# Altium schematic symbol library Schlib1.SchLib: 29 symbols
Pins are listed as number, name and electrical type; pins without a type are passive.

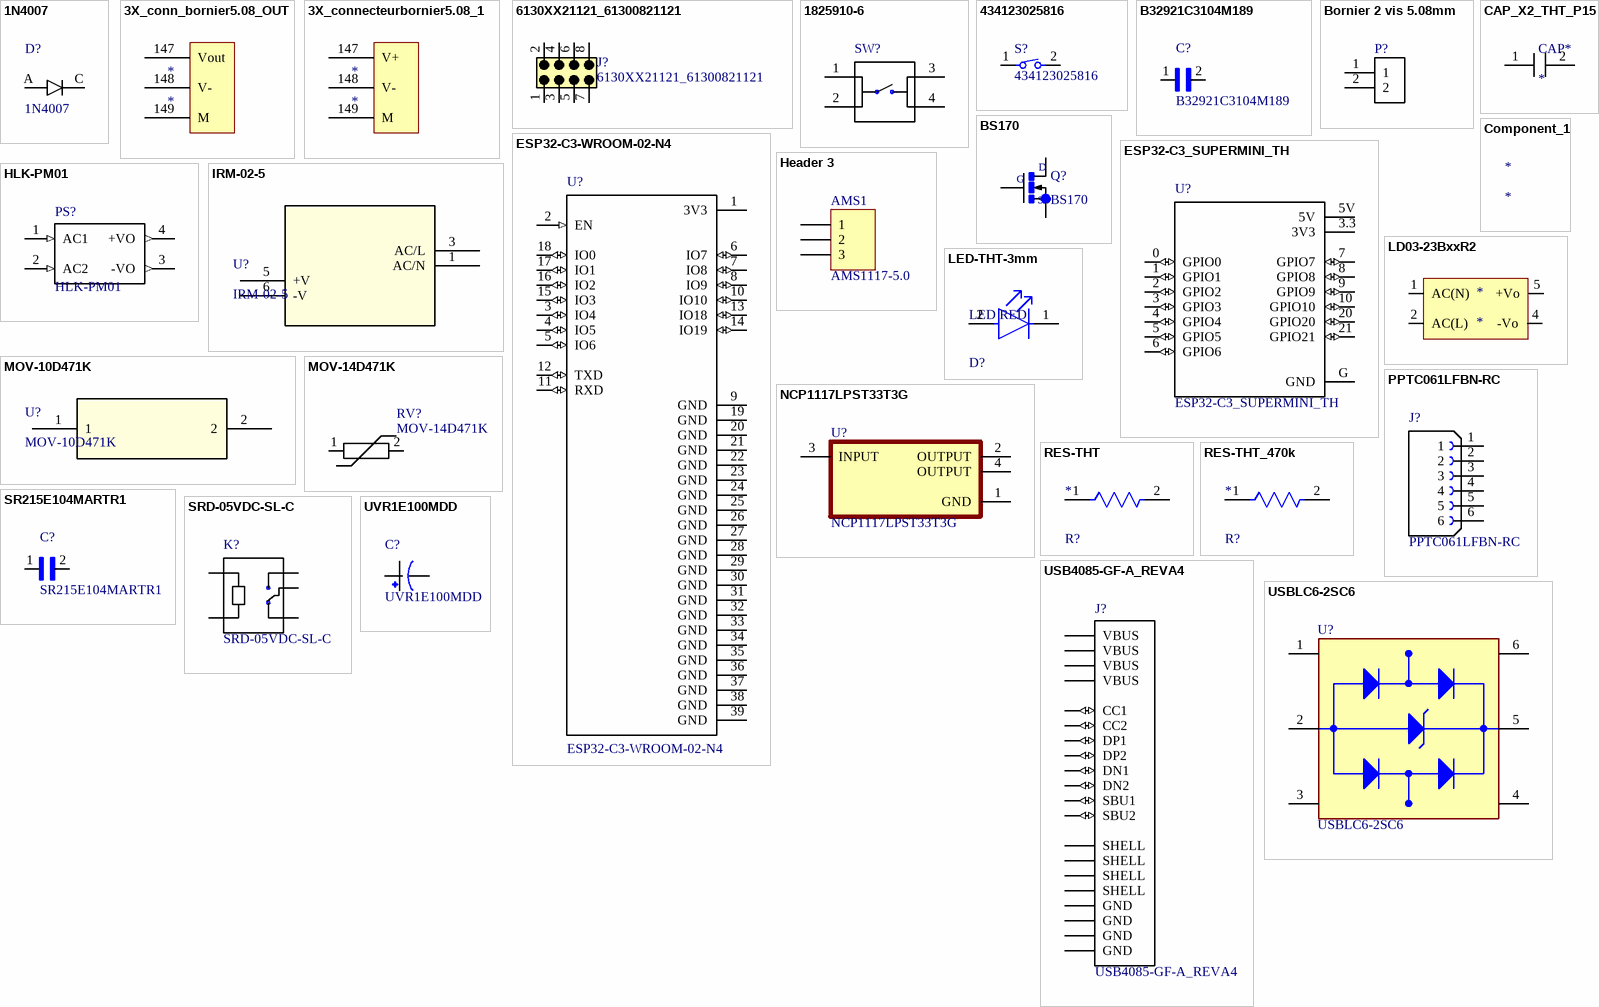
[diagram p0: symbols 1N4007 to UVR1E100MDD]

## 1N4007
designator D?
Rectifier Silicon, 1000V, 1 A, DO-41 Case, Solder Leads, 1N Series | NTE Electronics Inc. 1N4007; MF: NTE Electronics, Inc.; Package: DO-41 NTE Electronics; Price: None; SnapEDA_Link: https://www.snapeda.com/parts/1N4007/NTE+Electronics/view-part/?ref=snap; MP: 1N4007; Availability: In Stock; Check_prices: https://www.snapeda.com/parts/1N4007/NTE+Electronics/view-part/?ref=eda; Value: *
footprint *DIOAD1060W80L520D270_1N4007(Primary)
pins: A, C

## 3X_conn_bornier5.08_OUT
designator *
footprint 3X_conn_bornier_5.08_OUT (Horizontal Cable Entry with Rising Cage Clamp, pitch 5.08mm, 03p)
pins: 147 Vout, 148 V-, 149 M

## 3X_connecteurbornier5.08_1
designator *
footprint 3X_connecteur_bornier_5.08
pins: 147 V+, 148 V-, 149 M

## 6130XX21121_61300821121
designator J?
Connector Header Through Hole 8 position 0.100 (2.54mm); MF: Wurth Electronics; SnapEDA_Link: https://www.snapeda.com/parts/61300821121/Wurth+Electronics/view-part/?ref=snap; Package: None; Value: *; MP: 61300821121; Check_prices: https://www.snapeda.com/parts/61300821121/Wurth+Electronics/view-part/?ref=eda
footprint 61300821121
pins: 1, 2, 3, 4, 5, 6, 7, 8

## 1825910-6
designator SW?  (value not drawn)
Switch Push Button OFF (ON) SPST Round Button 0.05A 24VDC Momentary Contact PC Pins Thru-Hole; MF: TE Connectivity; Package: None; Price: None; SnapEDA_Link: https://www.snapeda.com/parts/1825910-6/TE+Connectivity+Alcoswitch+Switches/view-part/?ref=snap; MP: 1825910-6; Availability: In Stock; Check_prices: https://www.snapeda.com/parts/1825910-6/TE+Connectivity+Alcoswitch+Switches/view-part/?ref=eda; Value: *
footprint *SW_1825910-6-4
pins: 1, 2, 3, 4

## 434123025816
designator S?
Tactile Switch SPST-NO Top Actuated Surface Mount; MF: WÃ¼rth Elektronik; SnapEDA_Link: https://www.snapeda.com/parts/434123025816/W%25C3%25BCrth+Elektronik+Midcom/view-part/?ref=snap; Package: None; Value: *; MP: 434123025816; Check_prices: https://www.snapeda.com/parts/434123025816/W%25C3%25BCrth+Elektronik+Midcom/view-part/?ref=eda
footprint 434123025816
pins: 1, 2

## B32921C3104M189
designator C?
Cap Film Suppression X2 0.1uF 305VAC PP 20% (13 X 6 X 12mm) Radial Plastic Rectangular Can 10mm 105C T/R; MF: EPCOS; Package: Package; Price: None; SnapEDA_Link: https://www.snapeda.com/parts/B32921C3104M189/EPCOS/view-part/?ref=snap; MP: B32921C3104M189; Availability: In Stock; Check_prices: https://www.snapeda.com/parts/B32921C3104M189/EPCOS/view-part/?ref=eda; Value: *
footprint *CAPRR1000W60L1300T600H1200
pins: 1, 2

## Bornier 2 vis 5.08mm
designator P?, comment 282837-2  (value not drawn)
Terminal Block Connector Wire Receptacle 2 5.08 mm 30-16 AWG Green 13.5 A 250 V | TE Connectivity 282837-2; MF: TE Connectivity; Package: None; Price: None; Check_prices: https://www.snapeda.com/parts/282837-2/TE+Connectivity+AMP+Connectors/view-part/?ref=eda; SnapEDA_Link: https://www.snapeda.com/parts/282837-2/TE+Connectivity+AMP+Connectors/view-part/?ref=snap; MP: 282837-2; Availability: In Stock; Purchase-URL: https://www.snapeda.com/api/url_track_click_mouser/?unipart_id=2549980&manufacturer=TE Connectivity&part_name=282837-2&search_term=bornier 2 vis 5.08mm; Value: *
footprint *TE_282837-2
pins: 1, 2

## BS170
designator Q?
N-Channel 60 V 500mA (Ta) 830mW (Ta) Through Hole TO-92-3; MF: onsemi; Package: TO-92-3 ON Semiconductor; Price: None; SnapEDA_Link: https://www.snapeda.com/parts/BS170/Onsemi/view-part/?ref=snap; MP: BS170; Availability: In Stock; Check_prices: https://www.snapeda.com/parts/BS170/Onsemi/view-part/?ref=eda; Value: *
footprint *TO92
pins: 1 D, 2 G, 3 S

## CAP_X2_THT_P15
designator CAP*
footprint CAP_X2_THT_P15
pins: 1 +, 2 -

## Component_1
designator *

## ESP32-C3-WROOM-02-N4
designator U?
WiFi Modules (802.11) (Engineering Samples) SMD module, ESP32-C3, 4MB SPI flash, PCB antenna, -40 C +85 C; MF: Espressif Systems; Package: Package; Price: None; Check_prices: https://www.snapeda.com/parts/ESP32-C3-WROOM-02-N4/Espressif+Systems/view-part/?ref=eda; SnapEDA_Link: https://www.snapeda.com/parts/ESP32-C3-WROOM-02-N4/Espressif+Systems/view-part/?ref=snap; MP: ESP32-C3-WROOM-02-N4; Availability: In Stock; Purchase-URL: https://www.snapeda.com/api/url_track_click_mouser/?unipart_id=5683419&manufacturer=Espressif Systems&part_name=ESP32-C3-WROOM-02-N4&search_term=esp32-c3-wroom-02; Value: *
footprint *MODULE_ESP32-C3-WROOM-02-H4
pins: 1 3V3 (power), 2 EN (in), 3 IO4 (io), 4 IO5 (io), 5 IO6 (io), 6 IO7 (io), 7 IO8 (io), 8 IO9 (io), 9 GND (power), 10 IO10 (io), 11 RXD (io), 12 TXD (io), 13 IO18 (io), 14 IO19 (io), 15 IO3 (io), 16 IO2 (io), 17 IO1 (io), 18 IO0 (io), 19 GND (power), 20 GND (power), 21 GND (power), 22 GND (power), 23 GND (power), 24 GND (power), 25 GND (power), 26 GND (power), 27 GND (power), 28 GND (power), 29 GND (power), 30 GND (power), 31 GND (power), 32 GND (power), 33 GND (power), 34 GND (power), 35 GND (power), 36 GND (power), 37 GND (power), 38 GND (power), 39 GND (power)

## ESP32-C3_SUPERMINI_TH
designator U?
Super tiny ESP32-C3 board; MF: Espressif Systems; MP: ESP32-C3 SuperMini_TH; Package: Package; Price: None; SnapEDA_Link: https://www.snapeda.com/parts/ESP32-C3%20SuperMini_TH/Espressif+Systems/view-part/?ref=snap; Availability: Not in stock; Check_prices: https://www.snapeda.com/parts/ESP32-C3%20SuperMini_TH/Espressif+Systems/view-part/?ref=eda; Value: *
footprint *MODULE_ESP32-C3_SUPERMINI_TH_ESP32-C3_SUPERMINI_TH(Primary)
pins: 0 GPIO0 (io), 1 GPIO1 (io), 2 GPIO2 (io), 3 GPIO3 (io), 3.3 3V3 (power), 4 GPIO4 (io), 5 GPIO5 (io), 5V (power), 6 GPIO6 (io), 7 GPIO7 (io), 8 GPIO8 (io), 9 GPIO9 (io), 10 GPIO10 (io), 20 GPIO20 (io), 21 GPIO21 (io), G GND (power)

## Header 3
designator AMS1, comment AMS1117-5.0
Header, 3-Pin; LatestRevisionDate: 17-Jul-2002; LatestRevisionNote: Re-released for DXP Platform.; Publisher: Altium Limited
footprint HDR1X3 (Connector; Header; 3 Position)
signal-integrity model Connector
pins: 1, 2, 3

## HLK-PM01
designator PS?
The HLK-PM01 is a small size low cost AC to DC converter which can take in 110V/220V AC at 50/60 Hz and give 5V 3W output. The module is can be used in designs which run on 5V and needs to be powered form the AC mains.; MF: Hi-link; Package: None; Price: None; SnapEDA_Link: https://www.snapeda.com/parts/HLK-PM01/Hi-link/view-part/?ref=snap; MP: HLK-PM01; Availability: Not in stock; Check_prices: https://www.snapeda.com/parts/HLK-PM01/Hi-link/view-part/?ref=eda; Value: *
footprint *CONV_HLK-PM01
pins: 1 AC1 (in), 2 AC2 (in), 3 -VO (out), 4 +VO (out)

## IRM-02-5
designator U?
Description; Manufacturer_Name: Mean Well; Copyright: Copyright (C) 2026 Ultra Librarian. All rights reserved.; Manufacturer_Part_Number: IRM-02-5; RefDes: RefDes; Type: Type
footprint IRM-01-3.3_MWU
pins: 1 AC/N, 3 AC/L, 5 +V (power), 6 -V (power)

## LD03-23BxxR2
designator *
footprint LD03-23BxxR2
pins: 1 AC(N), 2 AC(L), 4 -Vo, 5 +Vo

## LED-THT-3mm
designator D?, comment LED RED
NexarPartId: 18785862; Power Rating: 160mW; Rise Time: 15ns; Peak Wavelength: 940nm; Lens Style: Circular, Diffused, Round; Reverse Voltage: 5V; Viewing Angle: 44°; Forward Current: 100mA; Number of Elements: 1; Forward Voltage: 1.35V; Length: 3.2mm; Min Operating Temperature: -25°C; Radiation Hardening: No; Power Dissipation: 160mW; Lead Free: Lead Free; Orientation: Top View; Case/Package: T; Max Power Dissipation: 160mW; Max Operating Temperature: 85°C; Fall Time: 15ns; Number of Pins: 2; Test Current: 100mA; RoHS: Compliant; REACH SVHC: Unknown; Mount: Through Hole; Number of LEDs: 1; Wavelength: 940nm; Packaging: Bulk; Depth: 3.2mm
footprint LED-THT-3mm
pins: 1 C, 2 A

## MOV-10D471K
designator U?
Description; Manufacturer_Name: Bourns Electronics; Copyright: Copyright (C) 2026 Ultra Librarian. All rights reserved.; Manufacturer_Part_Number: MOV-10D471K; RefDes: RefDes; Type: Type
footprint VAR_MOV-10D471K_BRN
pins: 1, 2

## MOV-14D471K
designator RV?
MOV-14D Series Metal Oxide Varistor 430pF 50A, Clamping 775V, Varistor 470V | Bourns MOV-14D471K; DigiKey_Part_Number: MOV-14D471K-ND; SnapEDA_Link: https://www.snapeda.com/parts/MOV-14D471K/Bourns/view-part/?ref=snap; Package: Disc-14 Bourns; MF: Bourns; MP: MOV-14D471K; Check_prices: https://www.snapeda.com/parts/MOV-14D471K/Bourns/view-part/?ref=eda; Value: *
footprint *MOV14D471K
pins: 1 (io), 2 (io)

## NCP1117LPST33T3G
designator U?
Linear Voltage Regulator IC Positive Fixed 1 Output 1A SOT-223; MF: ON Semiconductor; SnapEDA_Link: https://www.snapeda.com/parts/NCP1117LPST33T3G/Onsemi/view-part/?ref=snap; Package: SOT-223-4 ON Semiconductor; Value: *; MP: NCP1117LPST33T3G; Check_prices: https://www.snapeda.com/parts/NCP1117LPST33T3G/Onsemi/view-part/?ref=eda
footprint SOT230P700X175-4N
footprint SOT230P700X175-4N
pins: 1 GND (power), 2 OUTPUT, 3 INPUT, 4 OUTPUT

## PPTC061LFBN-RC
designator J?
6 Position Total Single Row 2.54 mm Pitch Straight Female Header; MF: Sullins Connector Solutions; MP: PPTC061LFBNRC; Package: None; Price: None; SnapEDA_Link: https://www.snapeda.com/parts/PPTC061LFBNRC/Sullins/view-part/?ref=snap; Availability: In Stock; Check_prices: https://www.snapeda.com/parts/PPTC061LFBNRC/Sullins/view-part/?ref=eda; Value: *
footprint *SULLINS_PPTC061LFBN-RC
pins: 1, 2, 3, 4, 5, 6

## RES-THT
designator R?
Through Hole Resistor; NexarPartId: 43762971; Temperature Coefficient: 50ppm/°C; Tolerance: 1%; Voltage Rating: 200V; Power Rating: 50mW; Lead Diameter: 410µm; Termination: Axial; Number of Terminations: 2; Max Operating Temperature: 175°C; Case/Package: Axial; Height: 2.03mm; Radiation Hardening: No; Mount: Through Hole; Diameter: 1.65mm; Length: 3.81mm; Width: 1.651mm; RoHS: Non-Compliant; Max Power Dissipation: 50mW; Features: Flame Retardant Coating, Military; Composition: Metal Film; Contact Plating: Lead, Tin; Packaging: Bulk; Military Standard: MIL-R-10509; Lead Free: Contains Lead; Min Operating Temperature: -65°C
footprint RES-THT
pins: 1, 2

## RES-THT_470k
designator R?
Through Hole Resistor; NexarPartId: 43762971; Temperature Coefficient: 50ppm/°C; Tolerance: 1%; Voltage Rating: 200V; Power Rating: 50mW; Lead Diameter: 410µm; Termination: Axial; Number of Terminations: 2; Max Operating Temperature: 175°C; Case/Package: Axial; Height: 2.03mm; Radiation Hardening: No; Mount: Through Hole; Diameter: 1.65mm; Length: 3.81mm; Width: 1.651mm; RoHS: Non-Compliant; Max Power Dissipation: 50mW; Features: Flame Retardant Coating, Military; Composition: Metal Film; Contact Plating: Lead, Tin; Packaging: Bulk; Military Standard: MIL-R-10509; Lead Free: Contains Lead; Min Operating Temperature: -65°C
footprint XTAL_ZTA-6.00MG
pins: 1, 2

## SR215E104MARTR1
designator C?
SR Series 5.08x5.08 mm 100 nF 50 V Â±20% Tol. Z5U Radial Lead/SkyCapÂ®; MF: AVX; Package: Radial AVX Interconnect / Elco; Price: None; SnapEDA_Link: https://www.snapeda.com/parts/SR215E104MARTR1/AVX/view-part/?ref=snap; MP: SR215E104MARTR1; Availability: In Stock; Check_prices: https://www.snapeda.com/parts/SR215E104MARTR1/AVX/view-part/?ref=eda; Value: *
footprint *CAPRR508W50L508T317H508
pins: 1, 2

## SRD-05VDC-SL-C
designator K?
5V Trigger Relay Module For Arduino And Raspberry Pi 5V Trigger Relay Module For Arduino And Raspberry Pi; MF: Songle Relay; Package: NON STANDARD-5 Songle Relay; Price: None; SnapEDA_Link: https://www.snapeda.com/parts/SRD-05VDC-SL-C/Songle+Relay/view-part/?ref=snap; MP: SRD-05VDC-SL-C; Availability: In Stock; Check_prices: https://www.snapeda.com/parts/SRD-05VDC-SL-C/Songle+Relay/view-part/?ref=eda; Value: *
footprint *RELAY_SRD-05VDC-SL-C_SRD-05VDC-SL-C(Primary)
pins: A1, A2, COM, NC, NO

## USB4085-GF-A_REVA4
designator J?
USB-C (USB TYPE-C) USB 2.0 Receptacle Connector 24 (16+8 Dummy) Position Through Hole, Right Angle, low cost, 3.46mm profile, 16 pin, horizontal, Top mount; MF: Global Connector Technology; Package: None; Price: None; Check_prices: https://www.snapeda.com/parts/USB4085-GF-A/Global+Connector+Technology/view-part/?ref=eda; SnapEDA_Link: https://www.snapeda.com/parts/USB4085-GF-A/Global+Connector+Technology/view-part/?ref=snap; MP: USB4085-GF-A; Availability: In Stock; Purchase-URL: https://www.snapeda.com/api/url_track_click_mouser/?unipart_id=2780390&manufacturer=Global Connector Technology&part_name=USB4085-GF-A&search_term=usb4085-gf-a; Value: *
footprint Conn Type C 2.0 (*GCT_USB4085-GF-A_REVA4_USB4085-GF-A_REVA4(Primary))
pins: A1 GND (power), A4 VBUS (power), A5 CC1 (io), A6 DP1 (io), A7 DN1 (io), A8 SBU1 (io), A9 VBUS (power), A12 GND (power), B1 GND (power), B4 VBUS (power), B5 CC2 (io), B6 DP2 (io), B7 DN2 (io), B8 SBU2 (io), B9 VBUS (power), B12 GND (power), S1 SHELL, S2 SHELL, S3 SHELL, S4 SHELL

## USBLC6-2SC6
designator U?
17V Clamp 5A (8/20Âµs) Ipp Tvs Diode Surface Mount SOT-23-6; MF: STMicroelectronics; Value: *; SnapEDA_Link: https://www.snapeda.com/parts/USBLC6-2SC6/STMicroelectronics/view-part/?ref=snap; Check_prices: https://www.snapeda.com/parts/USBLC6-2SC6/STMicroelectronics/view-part/?ref=eda; Purchase-URL: https://pricing.snapeda.com/search/part/USBLC6-2SC6/?ref=eda; Price: None; Availability: In Stock; Package: SOT-23-6 STMicroelectronics; MP: USBLC6-2SC6
footprint SOT95P280X145-6N
pins: 1 I/O1_IN, 2 GND, 3 I/O2_IN, 4 I/O2_OUT, 5 VBUS, 6 I/O1_OUT

## UVR1E100MDD
designator C?
10 ÂµF 25 V Aluminum Electrolytic Capacitors Radial, Can - 2000 Hrs @ 85Â°C; MF: Nichicon; Package: RADIAL-2 NICHICON; Price: None; SnapEDA_Link: https://www.snapeda.com/parts/UVR1E100MDD/Nichicon/view-part/?ref=snap; MP: UVR1E100MDD; Availability: In Stock; Check_prices: https://www.snapeda.com/parts/UVR1E100MDD/Nichicon/view-part/?ref=eda; Value: *
footprint *CAPPRD200W50D550H1250
pins: 1, 2